# EAGLE library part IC14 (library ics)
Generic integrated circuit, 14 pins
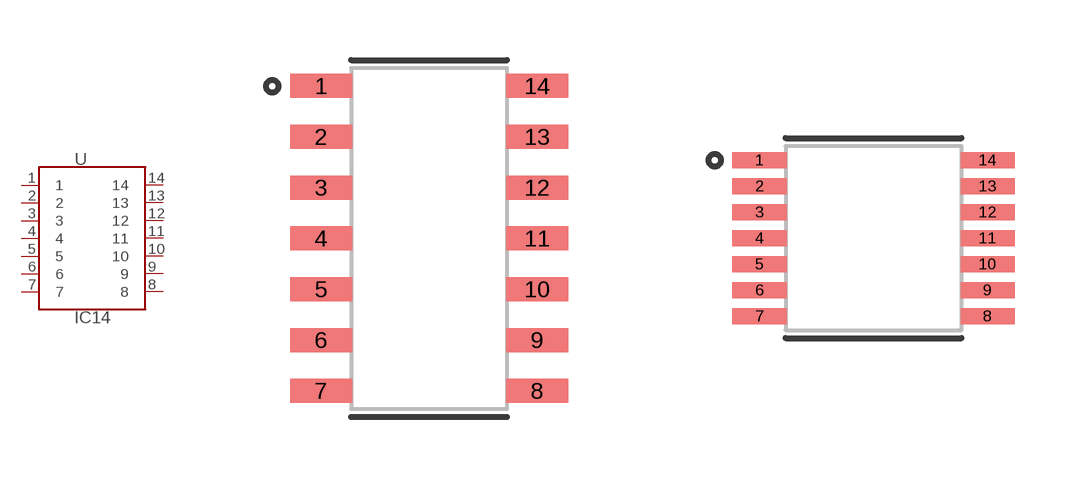
[diagram p1: symbol with the pads of SOIC-14; footprints SOIC-14, TSSOP-14]

Designator prefix U

## IC14SOIC  [SOIC-14]
1  1  pas
2  2  pas
3  3  pas
4  4  pas
5  5  pas
6  6  pas
7  7  pas
8  8  pas
9  9  pas
10  10  pas
11  11  pas
12  12  pas
13  13  pas
14  14  pas

## IC14TSSOP  [TSSOP-14]
Pads as for SOIC-14

## Footprint SOIC-14 (pad centres in mm)
Small outline package, 14 pins, pitch 1.27 mm, body 3.9 mm. Sizes: JEDEC MS-012 nominal sizes; pads worked out for this kit. Not verified against a datasheet.
smd 1.55 x 0.6: 1 -2.7,3.81; 2 -2.7,2.54; 3 -2.7,1.27; 4 -2.7,0; 5 -2.7,-1.27; 6 -2.7,-2.54; 7 -2.7,-3.81; 8 2.7,-3.81; 9 2.7,-2.54; 10 2.7,-1.27; 11 2.7,0; 12 2.7,1.27; 13 2.7,2.54; 14 2.7,3.81

## Footprint TSSOP-14 (pad centres in mm)
Thin shrink small outline package, 14 pins, pitch 0.65 mm, body 4.4 mm. Sizes: JEDEC MO-153 nominal sizes; pads worked out for this kit. Not verified against a datasheet.
smd 1.35 x 0.4: 1 -2.85,1.95; 2 -2.85,1.3; 3 -2.85,0.65; 4 -2.85,0; 5 -2.85,-0.65; 6 -2.85,-1.3; 7 -2.85,-1.95; 8 2.85,-1.95; 9 2.85,-1.3; 10 2.85,-0.65; 11 2.85,0; 12 2.85,0.65; 13 2.85,1.3; 14 2.85,1.95